# Altium schematic symbol library 502494-0470.SchLib: 1 symbol
Pins are listed as number, name and electrical type; pins without a type are passive.

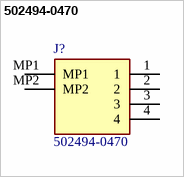
[diagram p0: symbol 502494-0470]

## 502494-0470
designator J?
MOLEX - 502494-0470 - RECEPTACLE, R/A, SMT, 4WAY, 2MM; Geometry.Height: 6.85mm; Mouser Part Number: 538-502494-0470; Mouser Price/Stock: https://www.mouser.co.uk/ProductDetail/Molex/502494-0470/?qs=zRnNmUVysJf%252Bc0fbcAK02g%3D%3D; Manufacturer_Name: Molex; Manufacturer_Part_Number: 502494-0470; Datasheet Link: https://www.molex.com/pdm_docs/sd/5024940470_sd.pdf
footprint 5024940470
pins: 1, 2, 3, 4, MP1, MP2